# Altium footprint library IC_SMD_DUAL.PcbLib: 184 footprints (part 12 of 12)
Each footprint in its own frame and in the unit in brackets; x right, y up, seen from the top. Pads: shape width x height; smd on the part's side, far side on the other; paste and mask are expansions set on the pad; w line width, h text height; cw(c..) or ccw(c..) is an arc to the next point about the centre after c.
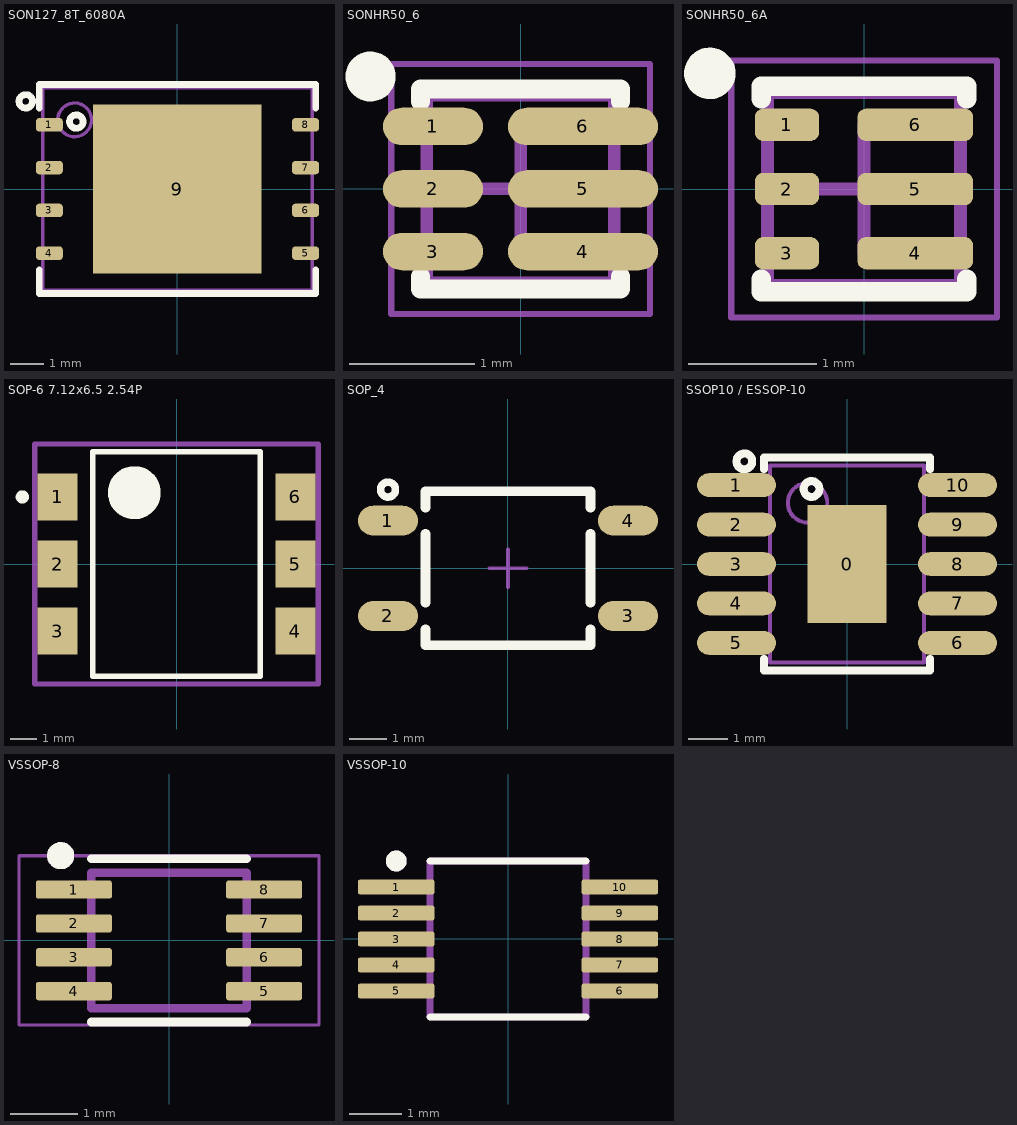
[diagram p11: the footprints below, top view; thin cyan lines are the x and y axes]

## SON127_8T_6080A [mm] "WSON 8, 6X8, pitch: 1.27mm"
height 0.8
pads (9):
  rrect50% 0.8x0.4 smd: 1(-3.8,1.905) 2(-3.8,0.635) 3(-3.8,-0.635) 4(-3.8,-1.905) 5(3.8,-1.905) 6(3.8,-0.635) 7(3.8,0.635) 8(3.8,1.905)
  rect 5x5 smd paste-3: 9(0,0)
Top Overlay:
  circle w0.2: c-3,2 r0.2
  circle w0.2: c-4.5,2.6 r0.2
  lines w0.2: -4.1,-2.4 -4.1,-3.1 4.1,-3.1 4.1,-2.4 ; -4.1,2.4 -4.1,3.1 4.1,3.1 4.1,2.4
Top Paste:
  rectangle: -1.9,1 -0.9,2
  rectangle: -0.5,1 0.5,2
  rectangle: 1,1 2,2
  region: -0.9,-0.5 -0.9,0.5 -1.9,0.5 -1.9,-0.5
  region: -0.9,-1.9 -0.9,-0.9 -1.9,-0.9 -1.9,-1.9
  region: 0.5,-0.5 0.5,0.5 -0.5,0.5 -0.5,-0.5
  region: 0.5,-1.9 0.5,-0.9 -0.5,-0.9 -0.5,-1.9
  region: 2,-0.5 2,0.5 1,0.5 1,-0.5
  region: 2,-1.9 2,-0.9 1,-0.9 1,-1.9
Top Designator:
  text ".Designator" at -3.96,-0.344 h1.52
Mechanical 13:
  circle w0.1: c-3.05,2.05 r0.5
  lines w0.1: -4,-3 4,-3 4,3 -4,3 -4,-3
3D body "User Library-WSON-8_6x8mm.STEP": height 0.81, standoff -0.07, extent -4,-3 4,3

## SONHR50_6 [mm] "VSON-HR, 6, DMQ, 0.5mm pitch, 1.5x1.5mm"
height 1
pads (6):
  oval 0.8x0.3 smd paste-0.05 mask+0.05: 1(-0.7,0.5) 2(-0.7,0) 3(-0.7,-0.5)
  oval 1.2x0.3 smd paste-0.05 mask+0.05: 4(0.5,-0.5) 5(0.5,0) 6(0.5,0.5)
Top Overlay:
  circle w0.2: c-1.2,0.9 r0.1
  lines w0.15: -0.8,-0.7 -0.8,-0.8 0.8,-0.8 0.8,-0.7 ; -0.8,0.7 -0.8,0.8 0.8,0.8 0.8,0.7
Top Designator:
  text ".Designator" at -3.835,-0.306 h1.52
Mechanical 13:
  lines w0.1: -0.75,-0.75 0.75,-0.75 0.75,0.75 -0.75,0.75 -0.75,-0.75
Mechanical 15:
  lines w0.05: -1.035,-1 1.035,-1 1.035,1 -1.035,1 -1.035,-1
  lines w0.1: -0.5,0 0.5,0 ; 0,-0.5 0,0.5
3D body "SONHR50_6.step": height 1, standoff 0, extent -0.751,-0.75 0.751,0.75

## SONHR50_6A [mm] "VSON-HR, 6, DMQ, 0.5mm pitch, 1.5x1.5mm"
height 1
pads (6):
  rrect50% 0.5x0.25 smd mask+0.05: 1(-0.6,0.5) 2(-0.6,0) 3(-0.6,-0.5)
  rrect50% 0.9x0.25 smd mask+0.05: 4(0.4,-0.5) 5(0.4,0) 6(0.4,0.5)
Top Overlay:
  circle w0.2: c-1.2,0.9 r0.1
  lines w0.15: -0.8,-0.7 -0.8,-0.8 0.8,-0.8 0.8,-0.7 ; -0.8,0.7 -0.8,0.8 0.8,0.8 0.8,0.7
Top Designator:
  text ".Designator" at -3.88,-0.306 h1.52
Mechanical 13:
  lines w0.1: -0.75,-0.75 0.75,-0.75 0.75,0.75 -0.75,0.75 -0.75,-0.75
Mechanical 15:
  lines w0.05: -1.035,-1 1.035,-1 1.035,1 -1.035,1 -1.035,-1
  lines w0.1: -0.5,0 0.5,0 ; 0,-0.5 0,0.5
3D body "SONHR50_6.step": height 1, standoff 0, extent -0.751,-0.75 0.751,0.75

## SOP-6 7.12x6.5 2.54P [mm] "PDIP6 8.51x6.35, 2.54P"
pads (6):
  rect 1.52x1.78 smd paste+0 mask+0: 1(-4.505,2.54) 2(-4.505,0) 3(-4.505,-2.54) 4(4.505,-2.54) 5(4.505,0) 6(4.505,2.54)
Top Overlay:
  circle w1: c-1.6,2.7 r0.5
  circle w0.25: c-5.84,2.54 r0.125
  lines w0.2: -3.175,-4.255 -3.175,4.255 3.175,4.255 3.175,-4.255 -3.175,-4.255
Top Designator:
  text ".Designator" at -4.023,-0.344 h1.52
Mechanical 10:
  lines w0.2: -5.365,-4.545 -5.365,4.545 5.365,4.545 5.365,-4.545 -5.365,-4.545
Mechanical 12:
  lines w0.15: -3.175,-4.255 -3.175,4.255 3.175,4.255 3.175,-4.255 -3.175,-4.255
3D body "MOC810X_SOIC_MODEL.STEP": height 4.65, standoff 0.02, extent -5.167,-4.333 5.133,4.302

## SOP_4 [mm] "SOP-4, 4.4X4.1mm  body 2.54mm pitch"
height 2.3
pads (4):
  oval 1.6x0.8 smd: 1(-3.2,1.27) 2(-3.2,-1.27) 3(3.2,-1.27) 4(3.2,1.27)
Top Overlay:
  circle w0.2: c-3.2,2.1 r0.2
  lines w0.254: -2.2,-1.62 -2.2,-2.05 2.2,-2.05 2.2,-1.62 ; -2.2,-0.92 -2.2,0.92 ; -2.2,1.62 -2.2,2.05 2.2,2.05 2.2,1.62 ; 2.2,-0.92 2.2,0.92
Top Designator:
  text ".Designator" at -3.71,-0.179 h1.52
Mechanical 15:
  lines w0.1: -0.5,0 0.5,0 ; 0,-0.5 0,0.5
3D body "3D_PCB1_2024-04-02.step": height 2.21, standoff -0.04, extent -3.5,-1.998 3.5,1.998

## SSOP10 / ESSOP-10 [mm] "SSOP-10, ESSOP-10, 5x3.9mm body 1mm pitch"
pads (11):
  rect 2x3 smd paste-3 mask+0.1: 0(0,0)
  oval 2x0.6 smd: 1(-2.8,2) 2(-2.8,1) 3(-2.8,0) 4(-2.8,-1) 5(-2.8,-2) 6(2.8,-2) 7(2.8,-1) 8(2.8,0) 9(2.8,1) 10(2.8,2)
Top Overlay:
  circle w0.2: c-2.6,2.6 r0.2
  circle w0.2: c-0.9,1.9 r0.2
  lines w0.2: -2.1,-2.4 -2.1,-2.7 2.1,-2.7 2.1,-2.4 ; -2.1,2.4 -2.1,2.7 2.1,2.7 2.1,2.4
Top Designator:
  text ".Designator" at -3.71,-0.344 h1.52
Mechanical 13:
  circle w0.1: c-1,1.55 r0.5
  lines w0.1: -0.5,0 0.5,0 ; 0,-0.5 0,0.5 ; -1.95,-2.5 1.95,-2.5 1.95,2.5 -1.95,2.5 -1.95,-2.5
3D body "SSOP10.step": height 1.32, standoff 0, extent -2.903,-2.4 2.903,2.4

## VSSOP-8 [mm]
height 2.3
pads (8):
  rrect25% 1.12x0.27 smd: 1(-1.405,0.75) 2(-1.405,0.25) 3(-1.405,-0.25) 4(-1.405,-0.75) 5(1.405,-0.75) 6(1.405,-0.25) 7(1.405,0.25) 8(1.405,0.75)
Top Overlay:
  circle w0.2: c-1.6,1.25 r0.1
  lines w0.127: -1.15,-1.205 1.15,-1.205 ; -1.15,1.205 1.15,1.205
Mechanical 13:
  circle w0.2: c-1.6,1.25 r0.1
  lines w0.127: -1.15,-1 -1.15,1 1.15,1 1.15,-1 -1.15,-1
Mechanical 15:
  lines w0.05: -2.215,-1.25 -2.215,1.25 2.215,1.25 2.215,-1.25 -2.215,-1.25
3D body "VSSOP8 _ SOT765 Package.stp": height 1, standoff 0, extent -1.617,-1.05 1.617,1.05

## VSSOP-10 [mm]
pads (10):
  rrect25% 1.47x0.28 smd: 1(-2.151,0.995) 2(-2.151,0.495) 3(-2.151,-0.005) 4(-2.151,-0.505) 5(-2.151,-1.005) 6(2.149,-1.005) 7(2.149,-0.505) 8(2.149,-0.005) 9(2.149,0.495) 10(2.149,0.995)
Top Overlay:
  circle w0.2: c-2.151,1.495 r0.1
  lines w0.127: -1.501,-1.505 1.499,-1.505 ; -1.501,1.495 1.499,1.495
Top Designator:
  text ".Designator" at -3.58,-0.312 h1.52
Mechanical 13:
  circle w0.2: c-2.151,1.495 r0.1
  lines w0.127: -1.501,-1.505 1.499,-1.505 1.499,1.495 -1.501,1.495 -1.501,-1.505
3D body "step_temp.STEP": height 1.1, standoff 0, extent -2.451,-1.505 2.449,1.495